# Altium footprint library KM_ALTIUM.PcbLib: 265 footprints (part 17 of 17)
Each footprint in its own frame and in the unit in brackets; x right, y up, seen from the top. Pads: shape width x height; smd on the part's side, far side on the other; paste and mask are expansions set on the pad; w line width, h text height; cw(c..) or ccw(c..) is an arc to the next point about the centre after c.
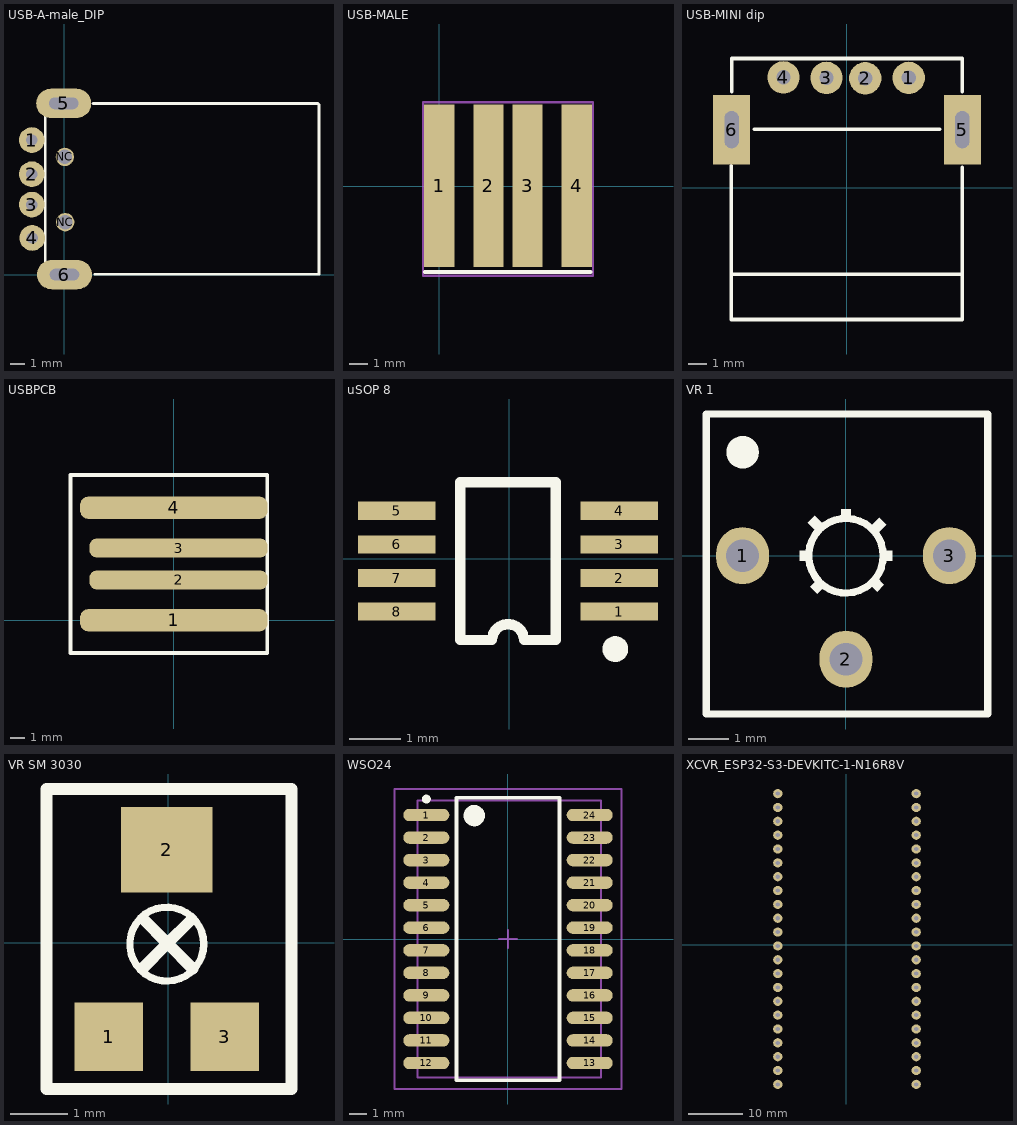
[diagram p16: the footprints below, top view; thin cyan lines are the x and y axes]

## USB-A-male_DIP [mil]
pads (8):
  round 70 hole 31: 1(-89,367) 2(-89,274) 3(-89,191) 4(-88,100)
  oval 150x80 hole 31 slot 80 at 0 deg: 5(-2,467) 6(0,0)
  round 50 hole 40: NC(1,321) NC(2,143)
Top Overlay:
  lines w7: -52,-14 -52,485
  lines w8: 78,467 691,467 694,464 694,1 83,1
3D body "Samtec3dPS-USB-AM.STEP": height 177.95, standoff -46.46, extent -93,-14.06 695.58,478.06

## USB-MALE [mm]
pads (4):
  rect 1.6x8.6 smd: 1(0,0.025) 2(2.6,0.025) 3(4.664,0.025) 4(7.264,0.025)
Top Overlay:
  lines w0.203: -0.762,-4.547 8.001,-4.547
Mechanical 3:
  lines w0.127: -0.864,-4.75 8.128,-4.75 8.128,4.445 -0.864,4.445 -0.864,-4.75

## USB-MINI dip [mil]
pads (6):
  round 70 hole 31: 1(134,238) 2(40,237) 3(-44,238) 4(-137,239)
  rect 80x150 hole 31 slot 80 at 90 deg: 5(250,126) 6(-249,126)
Top Overlay:
  lines w8: -250,-187 248,-187 ; -250,48 -250,-280 -250,-285 -230,-285 ; -249,208 -249,280 250,280 250,208 ; -245,-285 250,-285 250,44 ; -200,127 201,127
3D body "Samtec-USB-A-S-F-B-TH.STEP": height 293.81, standoff -136.26, extent -312.02,-277.56 310.01,277.56

## USBPCB [mil]
pads (4):
  rrect75% 500x60 smd: 1(0,0) 4(0,300)
  rrect75% 475x50 smd: 2(12.5,107.5) 3(12.5,192.5)
Top Overlay:
  lines w10: -276,-87.5 -276,387.5 249,387.5 249,-87.5 -276,-87.5

## uSOP 8 [mm]
pads (8):
  rect 1.5x0.35 smd: 1(2.126,-1.026) 2(2.126,-0.376) 3(2.126,0.274) 4(2.126,0.924) 5(-2.177,0.924) 6(-2.177,0.274) 7(-2.177,-0.376) 8(-2.177,-1.026)
Top Overlay:
  circle w0.25: c2.05,-1.751 r0.125
  lines w0.2: -0.95,-1.576 -0.334,-1.576 cw(c-0.025,-1.576) 0.283,-1.576 0.9,-1.576 0.9,1.474 -0.95,1.474 -0.95,-1.576
3D body "SW3dPS-uMAX8.STEP": height 0.95, standoff 0, extent -2.526,-1.552 2.475,1.448

## VR 1 [mm]
pads (3):
  oval 1.3x1.4 hole 0.8: 1(-2.54,0) 2(0,-2.54) 3(2.54,0)
Top Overlay:
  circle w0.4: c-2.54,2.54 r0.2
  circle w0.178: c0,0 r0.916
  region: -0.709,-0.582 -0.889,-0.762 -0.709,-0.942 -0.53,-0.762
  region: 0.762,-0.53 0.582,-0.709 0.762,-0.889 0.942,-0.709
  region: -0.762,0.994 -0.942,0.815 -0.762,0.635 -0.582,0.815
  region: 0.815,0.942 0.635,0.762 0.815,0.582 0.994,0.762
  region: -0.889,0.127 -1.143,0.127 -1.143,-0.127 -0.889,-0.127
  region: 1.143,-0.127 1.143,0.127 0.889,0.127 0.889,-0.127
  rectangle: -0.127,0.889 0.127,1.143
  lines w0.178: -3.429,-3.886 -3.429,3.48 3.48,3.48 3.48,-3.886 -3.429,-3.886
3D body "User Library-Bourns 3362R.STEP": height 4.7, standoff -5.47, extent -3.277,-3.734 3.323,3.32

## VR SM 3030 [mm]
pads (3):
  rect 1.2x1.2 smd: 1(-1.041,-1.651) 3(0.991,-1.651)
  rect 1.6x1.5 smd: 2(-0.025,1.625)
Top Overlay:
  circle w0.127: c-0.025,-0.025 r0.648
  lines w0.203: -0.457,-0.457 -0.025,-0.025 ; -0.432,0.406 -0.025,0 -0.025,-0.025 ; 0.406,0.406 -0.025,-0.025 ; 0.432,-0.457 0,-0.025 -0.025,-0.025 ; -2.134,-2.565 -2.134,2.692 2.159,2.692 2.159,-2.565 -2.134,-2.565
Mechanical 13:
  lines w0.127: -2.134,-2.565 2.134,-2.565 2.134,2.692 -2.134,2.692 -2.134,-2.565
3D body "3303X003.stp": height 1.3, standoff -0.05, extent -1.524,-1.772 1.473,1.975

## WSO24 [mm]
pads (24):
  oval 2.6x0.7 smd: 1(-4.6,6.985) 2(-4.6,5.715) 3(-4.6,4.445) 4(-4.6,3.175) 5(-4.6,1.905) 6(-4.6,0.635) 7(-4.6,-0.635) 8(-4.6,-1.905) 9(-4.6,-3.175) 10(-4.6,-4.445) 11(-4.6,-5.715) 12(-4.6,-6.985) 13(4.6,-6.985) 14(4.6,-5.715) 15(4.6,-4.445) 16(4.6,-3.175) 17(4.6,-1.905) 18(4.6,-0.635) 19(4.6,0.635) 20(4.6,1.905) 21(4.6,3.175) 22(4.6,4.445) 23(4.6,5.715) 24(4.6,6.985)
Top Overlay:
  circle w0.6: c-1.9,6.95 r0.3
  circle w0.25: c-4.6,7.885 r0.125
  lines w0.2: -2.9,-7.95 2.9,-7.95 2.9,7.95 -2.9,7.95 -2.9,-7.95
Mechanical 13:
  circle w0.1: c-1.88,6.96 r0.5
  lines w0.1: -5.105,-7.8 5.232,-7.8 5.232,7.8 -5.105,7.8 -5.105,-7.8
Mechanical 15:
  lines w0.1: -0.5,0 0.5,0 ; 0,-0.5 0,0.5 ; -6.4,-8.45 6.4,-8.45 6.4,8.45 -6.4,8.45 -6.4,-8.45
3D body "User Library-SO-24W.STEP": height 2.48, standoff 0, extent -5.104,-7.73 5.206,7.68

## XCVR_ESP32-S3-DEVKITC-1-N16R8V [mil]
height 290.94
pads (44):
  round 66.93 hole 30 paste+0 mask+4: J1_1(-495,1090) J1_2(-495,990) J1_3(-495,890) J1_4(-495,790) J1_5(-495,690) J1_6(-495,590) J1_7(-495,490) J1_8(-495,390) J1_9(-495,290) J1_10(-495,190) J1_11(-495,90) J1_12(-495,-10) J1_13(-495,-110) J1_14(-495,-210) J1_15(-495,-310) J1_16(-495,-410) J1_17(-495,-510) J1_18(-495,-610) J1_19(-495,-710) J1_20(-495,-810) J1_21(-495,-910) J1_22(-495,-1010) J3_1(505,1090) J3_2(505,990) J3_3(505,890) J3_4(505,790) J3_5(505,690) J3_6(505,590) J3_7(505,490) J3_8(505,390) J3_9(505,290) J3_10(505,190) J3_11(505,90) J3_12(505,-10) J3_13(505,-110) J3_14(505,-210) J3_15(505,-310) J3_16(505,-410) J3_17(505,-510) J3_18(505,-610) J3_19(505,-710) J3_20(505,-810) J3_21(505,-910) J3_22(505,-1010)
3D body "ESP32-S3-WROOM-1.STEP": height 364.21, standoff -142.13, extent -545.66,-1086.72 554.34,1408.94